# Altium footprint library Miscellaneous Connectors.PcbLib: 245 footprints (part 11 of 16)
Each footprint in its own frame and in the unit in brackets; x right, y up, seen from the top. Pads: shape width x height; smd on the part's side, far side on the other; paste and mask are expansions set on the pad; w line width, h text height; cw(c..) or ccw(c..) is an arc to the next point about the centre after c.
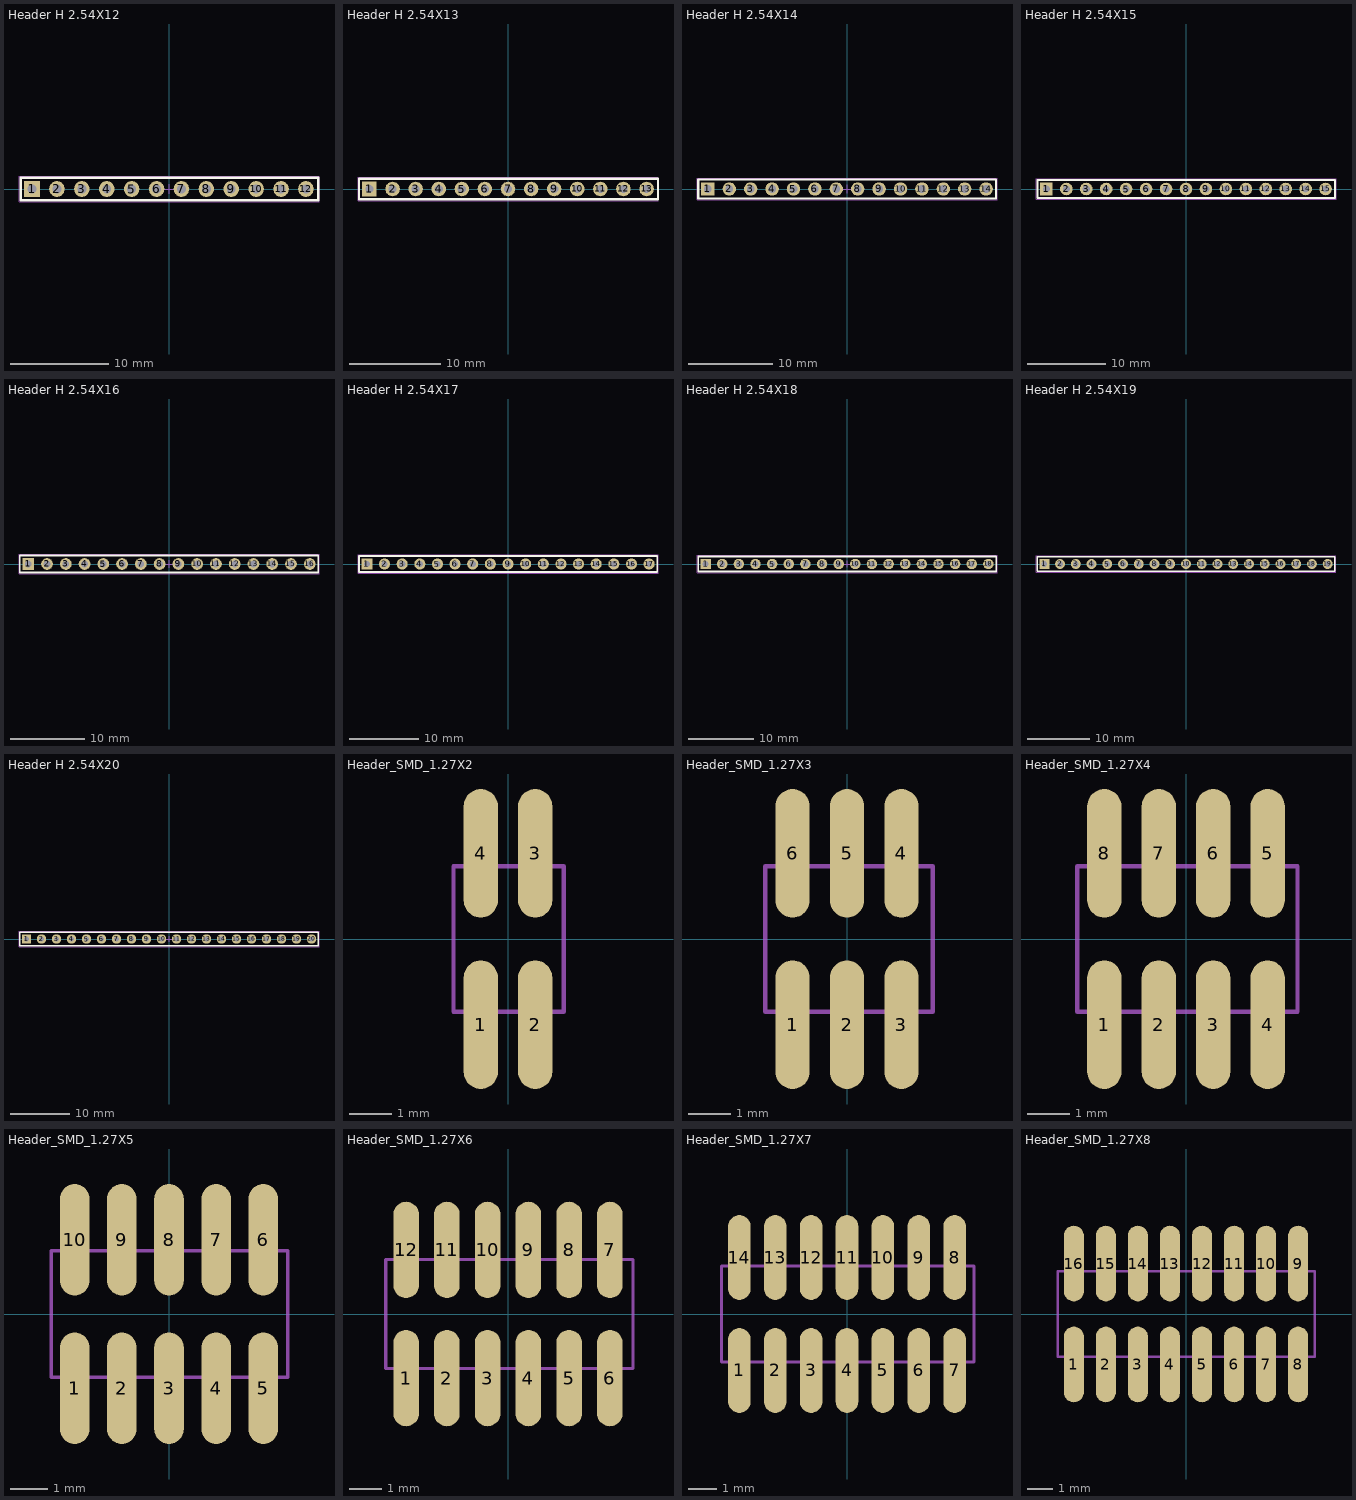
[diagram p10: the footprints below, top view; thin cyan lines are the x and y axes]

## Header H 2.54X12 [mm]
pads (12):
  rect 1.6x1.6 hole 0.9: 1(-13.97,0)
  round 1.6 hole 0.9: 2(-11.43,0) 3(-8.89,0) 4(-6.35,0) 5(-3.81,0) 6(-1.27,0) 7(1.27,0) 8(3.81,0) 9(6.35,0) 10(8.89,0) 11(11.43,0) 12(13.97,0)
Top Overlay:
  lines w0.254: -15.113,-1.143 15.2,-1.143 15.2,1.143 -15.113,1.143 -15.113,-1.143
Mechanical 15:
  lines w0.1: -0.5,0 0.5,0 ; 0,-0.5 0,0.5 ; -15.3,-1.3 15.3,-1.3 15.3,1.3 -15.3,1.3 -15.3,-1.3
3D body: height 4.43, standoff -2.9, extent -15.24,-1.25 15.24,7.02

## Header H 2.54X13 [mm]
pads (13):
  rect 1.6x1.6 hole 0.9: 1(-15.24,0)
  round 1.6 hole 0.9: 2(-12.7,0) 3(-10.16,0) 4(-7.62,0) 5(-5.08,0) 6(-2.54,0) 7(0,0) 8(2.54,0) 9(5.08,0) 10(7.62,0) 11(10.16,0) 12(12.7,0) 13(15.24,0)
Top Overlay:
  lines w0.254: -16.383,-1.143 -16.383,1.143 16.5,1.143 16.5,-1.143 -16.383,-1.143
Mechanical 15:
  lines w0.1: -16.5,-1.3 -16.5,1.3 16.5,1.3 16.5,-1.3 -16.5,-1.3
3D body: height 4.43, standoff -2.9, extent -16.51,-1.27 16.51,7

## Header H 2.54X14 [mm]
pads (14):
  rect 1.6x1.6 hole 0.9: 1(-16.51,0)
  round 1.6 hole 0.9: 2(-13.97,0) 3(-11.43,0) 4(-8.89,0) 5(-6.35,0) 6(-3.81,0) 7(-1.27,0) 8(1.27,0) 9(3.81,0) 10(6.35,0) 11(8.89,0) 12(11.43,0) 13(13.97,0) 14(16.51,0)
Top Overlay:
  lines w0.254: -17.653,-1.143 17.7,-1.143 17.7,1.143 -17.653,1.143 -17.653,-1.143
Mechanical 15:
  lines w0.1: -0.5,0 0.5,0 ; 0,-0.5 0,0.5 ; -17.8,-1.3 17.8,-1.3 17.8,1.3 -17.8,1.3 -17.8,-1.3
3D body: height 4.43, standoff -2.9, extent -17.78,-1.25 17.78,7.02

## Header H 2.54X15 [mm]
pads (15):
  rect 1.6x1.6 hole 0.9: 1(-17.78,0)
  round 1.6 hole 0.9: 2(-15.24,0) 3(-12.7,0) 4(-10.16,0) 5(-7.62,0) 6(-5.08,0) 7(-2.54,0) 8(0,0) 9(2.54,0) 10(5.08,0) 11(7.62,0) 12(10.16,0) 13(12.7,0) 14(15.24,0) 15(17.78,0)
Top Overlay:
  lines w0.254: -18.923,-1.143 19,-1.143 19,1.143 -18.923,1.143 -18.923,-1.143
Mechanical 15:
  lines w0.1: -19.1,-1.3 19.1,-1.3 19.1,1.3 -19.1,1.3 -19.1,-1.3
3D body: height 4.43, standoff -2.9, extent -19.05,-1.27 19.05,7

## Header H 2.54X16 [mm]
pads (16):
  rect 1.6x1.6 hole 0.9: 1(-19.05,0)
  round 1.6 hole 0.9: 2(-16.51,0) 3(-13.97,0) 4(-11.43,0) 5(-8.89,0) 6(-6.35,0) 7(-3.81,0) 8(-1.27,0) 9(1.27,0) 10(3.81,0) 11(6.35,0) 12(8.89,0) 13(11.43,0) 14(13.97,0) 15(16.51,0) 16(19.05,0)
Top Overlay:
  lines w0.254: -20.193,-1.143 20.2,-1.143 20.2,1.143 -20.193,1.143 -20.193,-1.143
Mechanical 15:
  lines w0.1: -0.5,0 0.5,0 ; 0,-0.5 0,0.5 ; -20.3,-1.3 20.3,-1.3 20.3,1.3 -20.3,1.3 -20.3,-1.3
3D body: height 4.43, standoff -2.9, extent -20.32,-1.26 20.32,7.01

## Header H 2.54X17 [mm]
pads (17):
  rect 1.6x1.6 hole 0.9: 1(-20.32,0)
  round 1.6 hole 0.9: 2(-17.78,0) 3(-15.24,0) 4(-12.7,0) 5(-10.16,0) 6(-7.62,0) 7(-5.08,0) 8(-2.54,0) 9(0,0) 10(2.54,0) 11(5.08,0) 12(7.62,0) 13(10.16,0) 14(12.7,0) 15(15.24,0) 16(17.78,0) 17(20.32,0)
Top Overlay:
  lines w0.254: -21.463,-1.143 21.5,-1.143 21.5,1.143 -21.463,1.143 -21.463,-1.143
Mechanical 15:
  lines w0.1: -21.6,-1.3 21.6,-1.3 21.6,1.3 -21.6,1.3 -21.6,-1.3
3D body: height 4.43, standoff -2.9, extent -21.59,-1.27 21.59,7

## Header H 2.54X18 [mm]
pads (18):
  rect 1.6x1.6 hole 0.9: 1(-21.59,0)
  round 1.6 hole 0.9: 2(-19.05,0) 3(-16.51,0) 4(-13.97,0) 5(-11.43,0) 6(-8.89,0) 7(-6.35,0) 8(-3.81,0) 9(-1.27,0) 10(1.27,0) 11(3.81,0) 12(6.35,0) 13(8.89,0) 14(11.43,0) 15(13.97,0) 16(16.51,0) 17(19.05,0) 18(21.59,0)
Top Overlay:
  lines w0.254: -22.733,-1.143 -22.733,1.143 22.8,1.143 22.8,-1.143 -22.733,-1.143
Mechanical 15:
  lines w0.1: -0.5,0 0.5,0 ; 0,-0.5 0,0.5 ; -22.9,-1.3 -22.9,1.3 22.9,1.3 22.9,-1.3 -22.9,-1.3
3D body: height 4.43, standoff -2.9, extent -22.863,-1.268 22.857,7.002

## Header H 2.54X19 [mm]
pads (19):
  rect 1.6x1.6 hole 0.9: 1(-22.86,0)
  round 1.6 hole 0.9: 2(-20.32,0) 3(-17.78,0) 4(-15.24,0) 5(-12.7,0) 6(-10.16,0) 7(-7.62,0) 8(-5.08,0) 9(-2.54,0) 10(0,0) 11(2.54,0) 12(5.08,0) 13(7.62,0) 14(10.16,0) 15(12.7,0) 16(15.24,0) 17(17.78,0) 18(20.32,0) 19(22.86,0)
Top Overlay:
  lines w0.254: -24.003,-1.143 -24.003,1.143 24,1.143 24,-1.143 -24.003,-1.143
Mechanical 15:
  lines w0.1: -24.2,-1.3 -24.2,1.3 24.2,1.3 24.2,-1.3 -24.2,-1.3
3D body: height 4.43, standoff -2.9, extent -24.123,-1.268 24.137,7.002

## Header H 2.54X20 [mm]
pads (20):
  rect 1.6x1.6 hole 0.9: 1(-24.13,0)
  round 1.6 hole 0.9: 2(-21.59,0) 3(-19.05,0) 4(-16.51,0) 5(-13.97,0) 6(-11.43,0) 7(-8.89,0) 8(-6.35,0) 9(-3.81,0) 10(-1.27,0) 11(1.27,0) 12(3.81,0) 13(6.35,0) 14(8.89,0) 15(11.43,0) 16(13.97,0) 17(16.51,0) 18(19.05,0) 19(21.59,0) 20(24.13,0)
Top Overlay:
  lines w0.254: -25.273,-1.143 25.3,-1.143 25.3,1.143 -25.273,1.143 -25.273,-1.143
Mechanical 15:
  lines w0.1: -0.5,0 0.5,0 ; 0,-0.5 0,0.5 ; -25.4,-1.3 25.4,-1.3 25.4,1.3 -25.4,1.3 -25.4,-1.3
3D body: height 4.43, standoff -2.9, extent -25.4,-1.27 25.4,7

## Header_SMD_1.27X2 [mm]
pads (4):
  oval 0.8x3 smd: 1(-0.635,-2) 2(0.635,-2) 3(0.635,2) 4(-0.635,2)
Mechanical 15:
  lines w0.1: -1.27,-1.7 1.3,-1.7 1.3,1.7 -1.27,1.7 -1.27,-1.7
3D body: height 6.4, standoff 0, extent -1.24,-2.752 1.3,2.752

## Header_SMD_1.27X3 [mm]
pads (6):
  oval 0.8x3 smd: 1(-1.27,-2) 2(0,-2) 3(1.27,-2) 4(1.27,2) 5(0,2) 6(-1.27,2)
Mechanical 15:
  lines w0.1: -1.905,-1.7 -1.905,1.7 2,1.7 2,-1.7 -1.905,-1.7
3D body: height 6.4, standoff 0, extent -1.875,-2.752 1.935,2.752

## Header_SMD_1.27X4 [mm]
pads (8):
  oval 0.8x3 smd: 1(-1.905,-2) 2(-0.635,-2) 3(0.635,-2) 4(1.905,-2) 5(1.905,2) 6(0.635,2) 7(-0.635,2) 8(-1.905,2)
Mechanical 15:
  lines w0.1: -2.54,-1.7 2.6,-1.7 2.6,1.7 -2.54,1.7 -2.54,-1.7
3D body: height 6.4, standoff 0, extent -2.51,-2.752 2.57,2.752

## Header_SMD_1.27X5 [mm]
pads (10):
  oval 0.8x3 smd: 1(-2.54,-2) 2(-1.27,-2) 3(0,-2) 4(1.27,-2) 5(2.54,-2) 6(2.54,2) 7(1.27,2) 8(0,2) 9(-1.27,2) 10(-2.54,2)
Mechanical 15:
  lines w0.1: -3.175,-1.7 -3.175,1.7 3.2,1.7 3.2,-1.7 -3.175,-1.7
3D body: height 6.4, standoff 0, extent -3.145,-2.752 3.205,2.752

## Header_SMD_1.27X6 [mm]
pads (12):
  oval 0.8x3 smd: 1(-3.175,-2) 2(-1.905,-2) 3(-0.635,-2) 4(0.635,-2) 5(1.905,-2) 6(3.175,-2) 7(3.175,2) 8(1.905,2) 9(0.635,2) 10(-0.635,2) 11(-1.905,2) 12(-3.175,2)
Mechanical 15:
  lines w0.1: -3.81,-1.7 3.9,-1.7 3.9,1.7 -3.81,1.7 -3.81,-1.7
3D body: height 6.4, standoff 0, extent -3.78,-2.752 3.84,2.752

## Header_SMD_1.27X7 [mm]
pads (14):
  oval 0.8x3 smd: 1(-3.81,-2) 2(-2.54,-2) 3(-1.27,-2) 4(0,-2) 5(1.27,-2) 6(2.54,-2) 7(3.81,-2) 8(3.81,2) 9(2.54,2) 10(1.27,2) 11(0,2) 12(-1.27,2) 13(-2.54,2) 14(-3.81,2)
Mechanical 15:
  lines w0.1: -4.445,-1.7 -4.445,1.7 4.5,1.7 4.5,-1.7 -4.445,-1.7
3D body: height 6.4, standoff 0, extent -4.415,-2.752 4.475,2.752

## Header_SMD_1.27X8 [mm]
pads (16):
  oval 0.8x3 smd: 1(-4.445,-2) 2(-3.175,-2) 3(-1.905,-2) 4(-0.635,-2) 5(0.635,-2) 6(1.905,-2) 7(3.175,-2) 8(4.445,-2) 9(4.445,2) 10(3.175,2) 11(1.905,2) 12(0.635,2) 13(-0.635,2) 14(-1.905,2) 15(-3.175,2) 16(-4.445,2)
Mechanical 15:
  lines w0.1: -5.08,-1.7 5.1,-1.7 5.1,1.7 -5.08,1.7 -5.08,-1.7
3D body: height 6.4, standoff 0, extent -5.05,-2.752 5.11,2.752